# Altium footprint library TO.PcbLib: 38 footprints (part 2 of 3)
Each footprint in its own frame and in the unit in brackets; x right, y up, seen from the top. Pads: shape width x height; smd on the part's side, far side on the other; paste and mask are expansions set on the pad; w line width, h text height; cw(c..) or ccw(c..) is an arc to the next point about the centre after c.
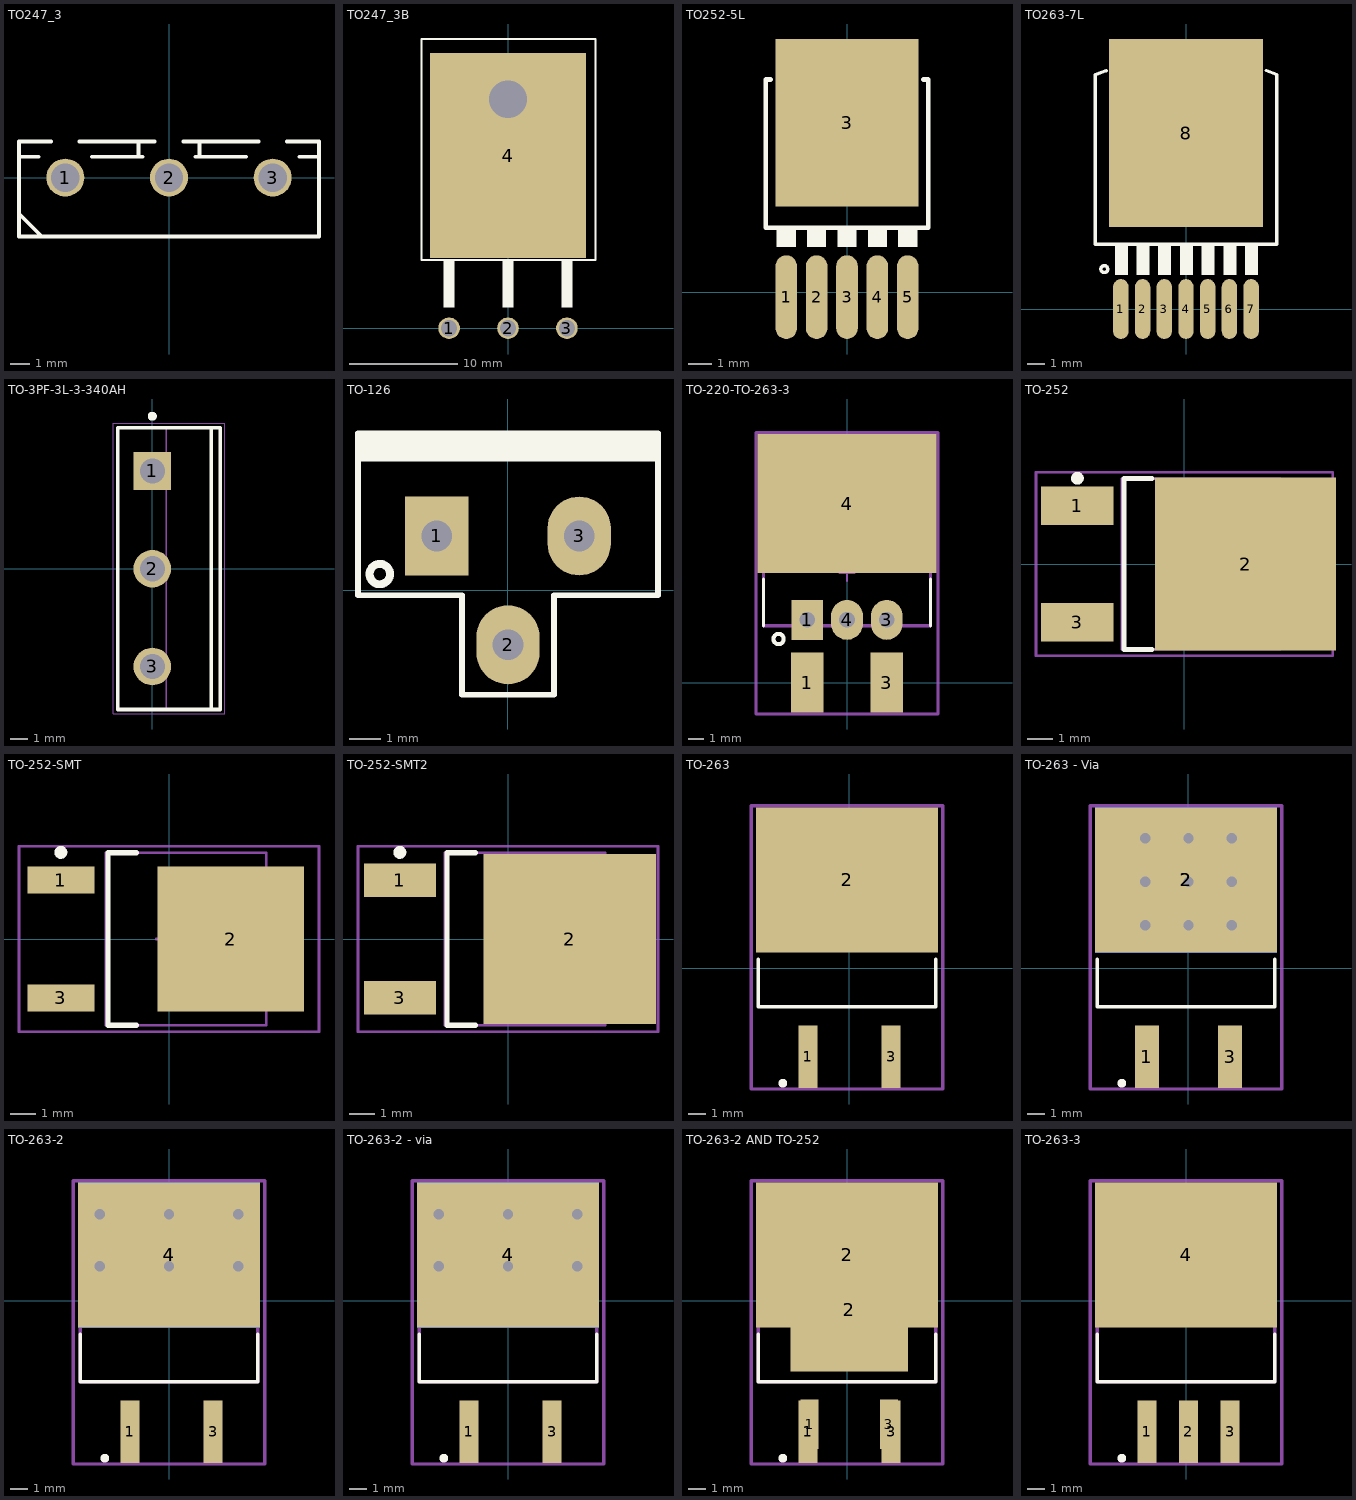
[diagram p1: the footprints below, top view; thin cyan lines are the x and y axes]

## TO247_3 [mm] "TO247, TO-247, TO-3P pitch: 5.5mm 16x5mm, TO-218"
pads (3):
  round 2 / inner round 2 / far side oval 2.4x3.6 hole 1.5: 1(-5.461,0) 2(0,0) 3(5.461,0)
Top Overlay:
  lines w0.2: -7.9,-1.9 -6.7,-3.1 ; -7.9,1.1 -6.861,1.1 ; -6.211,1.9 -7.9,1.9 -7.9,-3.1 7.9,-3.1 7.9,1.9 6.211,1.9 ; -4.711,1.9 -0.75,1.9 ; -4.061,1.1 -1.4,1.1 ; -1.6,1.1 -1.6,1.9 ; 0.75,1.9 4.711,1.9 ; 1.4,1.1 4.061,1.1 ; 1.6,1.1 1.6,1.9 ; 6.861,1.1 7.9,1.1
Top Assembly (Mech9):
  text ".Designator" at -3.65,-0.338 h1.5
3D body "TO-3P-3LD_new.step": height 23.92, standoff -3.48, extent -7.8,-3.003 7.8,1.807

## TO247_3B [mm] "TO247, TO-247, TO-3P BENDED, pitch: 5.5mm  TO-218"
pads (4):
  round 2 / inner round 2 / far side oval 2.4x3.6 hole 1.5: 1(-5.461,0) 2(0,0) 3(5.461,0)
  rect 14.5x19 smd: 4(0,16.001)
via 0,21.212 diameter 3.5 hole 3.5
Top Overlay:
  rectangle: -0.508,1.9 0.508,6.3
  rectangle: -5.988,1.9 -4.972,6.3
  region: 5.988,6.3 4.972,6.3 4.972,1.9 5.988,1.9
  lines w0.2: -8,6.318 8.1,6.318 8.1,26.8 -8,26.8 -8,6.318
  text "1" at -5.334,6.953 h1.02
  text "3" at 4.953,6.953 h1.02
Mechanical 1:
  circle w0.2: c0,21.2 r2
Top Assembly (Mech9):
  text ".Designator" at -3.65,-0.338 h1.5
3D body "User Library-TO-247_bent_leads.step": height 5.4, standoff -6.6, extent -7.95,-0.3 7.95,26.682

## TO252-5L [mm]
pads (6):
  oval 0.9x3.5 smd: 1(-2.54,-0.2) 2(-1.27,-0.2) 3(0,-0.2) 4(1.27,-0.2) 5(2.54,-0.2)
  rect 6x7 smd paste-5: 3(0,7.1)
Top Overlay:
  rectangle: 2.14,1.9 2.94,2.694
  rectangle: -0.4,1.9 0.4,2.694
  rectangle: -1.67,1.9 -0.87,2.694
  rectangle: -2.94,1.9 -2.14,2.694
  rectangle: 0.87,1.9 1.67,2.694
  lines w0.2: -3.2,8.9 -3.4,8.9 -3.4,2.7 3.4,2.7 3.4,8.9 3.2,8.9
Top Paste:
  rectangle: 0.2,5.2 1.2,6.2
  region: 1.2,6.6 1.2,7.6 0.2,7.6 0.2,6.6
  region: 2.6,6.2 1.6,6.2 1.6,5.2 2.6,5.2
  region: 1.2,4.8 0.2,4.8 0.2,3.8 1.2,3.8
  region: 2.6,3.8 2.6,4.8 1.6,4.8 1.6,3.8
  region: 1.6,7.6 1.6,6.6 2.6,6.6 2.6,7.6
  region: 2.6,8 2.6,9 1.6,9 1.6,8
  region: 1.2,9 0.2,9 0.2,8 1.2,8
  region: 2.6,10.4 1.6,10.4 1.6,9.4 2.6,9.4
  rectangle: 0.2,9.4 1.2,10.4
  region: -0.2,10.4 -1.2,10.4 -1.2,9.4 -0.2,9.4
  rectangle: -2.6,9.4 -1.6,10.4
  rectangle: -1.2,8 -0.2,9
  region: -1.6,8 -1.6,9 -2.6,9 -2.6,8
  region: -2.6,7.6 -2.6,6.6 -1.6,6.6 -1.6,7.6
  region: -1.6,3.8 -1.6,4.8 -2.6,4.8 -2.6,3.8
  rectangle: -1.2,3.8 -0.2,4.8
  rectangle: -2.6,5.2 -1.6,6.2
  region: -0.2,6.6 -0.2,7.6 -1.2,7.6 -1.2,6.6
  region: -0.2,6.2 -1.2,6.2 -1.2,5.2 -0.2,5.2
3D body "User Library-DPAK-5-1.step": height 2.4, standoff -0.01, extent -3.35,-0.866 3.35,10

## TO263-7L [mm]
pads (8):
  oval 0.9x3.5 smd: 1(-3.81,0) 2(-2.54,0) 3(-1.27,0) 4(0,0) 5(1.27,0) 6(2.54,0) 7(3.81,0)
  rect 9x11 smd paste-5: 8(0,10.3)
Top Overlay:
  circle w0.2: c-4.779,2.34 r0.2
  rectangle: 3.454,2 4.216,3.8
  rectangle: 2.184,2 2.946,3.8
  rectangle: 0.914,2 1.676,3.8
  rectangle: -0.356,2 0.406,3.8
  rectangle: -1.626,2 -0.864,3.8
  rectangle: -2.896,2 -2.134,3.8
  rectangle: -4.166,2 -3.404,3.8
  lines w0.2: -4.658,13.952 -5.3,13.709 -5.3,3.8 5.3,3.8 5.3,13.724 4.684,13.958
Top Paste:
  region: -0.2,7.7 -1.2,7.7 -1.2,6.7 -0.2,6.7
  rectangle: -4,6.7 -3,7.7
  region: -0.2,8.1 -0.2,9.1 -1.2,9.1 -1.2,8.1
  region: -3,5.3 -3,6.3 -4,6.3 -4,5.3
  rectangle: -4,8.1 -3,9.1
  rectangle: -2.6,6.7 -1.6,7.7
  rectangle: -1.2,5.3 -0.2,6.3
  region: -1.6,5.3 -1.6,6.3 -2.6,6.3 -2.6,5.3
  region: -2.6,9.1 -2.6,8.1 -1.6,8.1 -1.6,9.1
  region: -2.6,13.3 -2.6,12.3 -1.6,12.3 -1.6,13.3
  region: -1.6,9.5 -1.6,10.5 -2.6,10.5 -2.6,9.5
  rectangle: -1.2,9.5 -0.2,10.5
  rectangle: -2.6,10.9 -1.6,11.9
  rectangle: -4,12.3 -3,13.3
  region: -3,9.5 -3,10.5 -4,10.5 -4,9.5
  region: -0.2,12.3 -0.2,13.3 -1.2,13.3 -1.2,12.3
  rectangle: -4,10.9 -3,11.9
  region: -0.2,11.9 -1.2,11.9 -1.2,10.9 -0.2,10.9
  region: -0.2,14.7 -1.2,14.7 -1.2,13.7 -0.2,13.7
  rectangle: -4,13.7 -3,14.7
  rectangle: -2.6,13.7 -1.6,14.7
  region: 2.6,14.7 1.6,14.7 1.6,13.7 2.6,13.7
  region: 4,14.7 3,14.7 3,13.7 4,13.7
  rectangle: 0.2,13.7 1.2,14.7
  rectangle: 0.2,10.9 1.2,11.9
  region: 4,11.9 3,11.9 3,10.9 4,10.9
  region: 1.2,12.3 1.2,13.3 0.2,13.3 0.2,12.3
  region: 4,9.5 4,10.5 3,10.5 3,9.5
  region: 4,13.3 3,13.3 3,12.3 4,12.3
  region: 2.6,11.9 1.6,11.9 1.6,10.9 2.6,10.9
  region: 1.2,10.5 0.2,10.5 0.2,9.5 1.2,9.5
  region: 2.6,9.5 2.6,10.5 1.6,10.5 1.6,9.5
  region: 1.6,13.3 1.6,12.3 2.6,12.3 2.6,13.3
  region: 1.6,9.1 1.6,8.1 2.6,8.1 2.6,9.1
  region: 2.6,5.3 2.6,6.3 1.6,6.3 1.6,5.3
  region: 1.2,6.3 0.2,6.3 0.2,5.3 1.2,5.3
  region: 2.6,7.7 1.6,7.7 1.6,6.7 2.6,6.7
  region: 4,9.1 3,9.1 3,8.1 4,8.1
  region: 4,5.3 4,6.3 3,6.3 3,5.3
  region: 1.2,8.1 1.2,9.1 0.2,9.1 0.2,8.1
  region: 4,7.7 3,7.7 3,6.7 4,6.7
  rectangle: 0.2,6.7 1.2,7.7
3D body "User Library-D2PAK-7.step": height 4.5, standoff 0, extent -5.2,-1.6 5.2,14.074

## TO-3PF-3L-3-340AH [mm] "FM, 3-Leads, Body 15.7x5.7mm, Pitch 5.45mm"
height 29.9
pads (3):
  rect 2.1x2.1 hole 1.4: 1(0,5.45)
  round 2.1 hole 1.4: 2(0,0) 3(0,-5.45)
Top Overlay:
  circle w0.25: c0,8.5 r0.125
  lines w0.2: 3.28,-7.85 3.28,7.85 ; -1.92,-7.85 -1.92,7.85 3.78,7.85 3.78,-7.85 -1.92,-7.85
Mechanical 1:
  lines w0.1: 0.78,-7.85 0.78,7.85 ; -1.92,-7.85 -1.92,7.85 3.78,7.85 3.78,-7.85 -1.92,-7.85
Mechanical 15:
  lines w0.05: -2.17,-8.1 4.03,-8.1 4.03,8.1 -2.17,8.1 -2.17,-8.1
  lines w0.1: -0.5,0 0.5,0 ; 0,-0.5 0,0.5
3D body: height 23.64, standoff 23.6, extent 0.78,0.351 3.78,7.75
3D body: height 0, standoff -1.6, extent -0.475,5.05 0.475,5.85
3D body: height 25.76, standoff 25.4, extent 0.78,-7.75 3.78,-1.8
3D body: height 25.4, standoff 25.05, extent 0.78,-7.75 3.78,-1.8
3D body: height 26.09, standoff 25.75, extent 0.78,-7.75 3.78,-1.765
3D body: height 25.05, standoff 24.71, extent 0.78,-7.75 3.78,-1.765
3D body: height 26.41, standoff 26.09, extent 0.78,-7.75 3.78,-1.663
3D body: height 24.72, standoff 24.4, extent 0.78,-7.75 3.78,-1.663
3D body: height 26.68, standoff 26.4, extent 0.78,-7.75 3.78,-1.497
3D body: height 24.4, standoff 24.13, extent 0.78,-7.75 3.78,-1.497
3D body: height 26.9, standoff 26.67, extent 0.78,-7.75 3.78,-1.273
3D body: height 24.13, standoff 23.9, extent 0.78,-7.75 3.78,-1.273
3D body: height 0, standoff -1.6, extent -0.475,-0.4 0.475,0.4
3D body: height 4.8, standoff 0, extent -0.475,4.45 0.475,6.45
3D body: height 27.07, standoff 26.9, extent 0.78,-7.75 3.78,-1
3D body: height 23.91, standoff 23.74, extent 0.78,-7.75 3.78,-1
3D body: height 27.17, standoff 27.06, extent 0.78,-7.75 3.78,-0.689
3D body: height 23.74, standoff 23.63, extent 0.78,-7.75 3.78,-0.689
3D body: height 27.2, standoff 27.17, extent 0.78,-7.75 3.78,-0.351
3D body: height 25.76, standoff 25.4, extent 0.78,1.8 3.78,7.75
3D body: height 25.4, standoff 25.05, extent 0.78,1.8 3.78,7.75
3D body: height 26.09, standoff 25.75, extent 0.78,1.765 3.78,7.75
3D body: height 25.05, standoff 24.71, extent 0.78,1.765 3.78,7.75
3D body: height 26.41, standoff 26.09, extent 0.78,1.663 3.78,7.75
3D body: height 24.72, standoff 24.4, extent 0.78,1.663 3.78,7.75
3D body: height 26.68, standoff 26.4, extent 0.78,1.497 3.78,7.75
3D body: height 24.4, standoff 24.13, extent 0.78,1.497 3.78,7.75
3D body: height 26.9, standoff 26.67, extent 0.78,1.273 3.78,7.75
3D body: height 24.13, standoff 23.9, extent 0.78,1.273 3.78,7.75
3D body: height 27.07, standoff 26.9, extent 0.78,1 3.78,7.75
3D body: height 0, standoff -1.6, extent -0.475,-5.85 0.475,-5.05
3D body: height 4.8, standoff 0, extent -0.475,-6.45 0.475,-4.45
3D body: height 23.64, standoff 23.6, extent 0.78,-7.75 3.78,-0.351
3D body: height 23.91, standoff 23.74, extent 0.78,1 3.78,7.75
3D body: height 27.17, standoff 27.06, extent 0.78,0.689 3.78,7.75
3D body: height 23.74, standoff 23.63, extent 0.78,0.689 3.78,7.75
3D body: height 27.2, standoff 27.17, extent 0.78,0.351 3.78,7.75
3D body: height 23.6, standoff 19.9, extent 0.78,-7.75 3.78,7.75
3D body: height 4.8, standoff 0, extent -0.475,-1 0.475,1
3D body: height 29.9, standoff 27.2, extent 0.78,-7.75 3.78,7.75
3D body: height 19.9, standoff 4.8, extent -1.92,-7.85 3.78,7.85

## TO-126 [mil] "TO-126 - 1-2-3"
height 200
pads (3):
  rect 80x100 hole 39: 1(-90.16,68.9)
  oval 80x100 hole 39: 2(0,-68.9) 3(90.16,68.9)
Top Overlay:
  circle w10: c-162.4,20.67 r12.97
  rectangle: -189.96,162.9 189.96,198.9
  lines w7: -189.96,-6.1 -189.96,198.9 189.96,198.9 189.96,-6.1 58.27,-6.1 58.27,-132.09 -58.27,-132.09 -58.27,-6.1 -189.96,-6.1
3D body "TO-126_factory.stp": height 622.05, standoff -354.33, extent -169.29,20.9 169.29,129.17

## TO-220-TO-263-3 [mil]
pads (6):
  rect 81.89x150 smd paste+0 mask+0: 1(-100,0) 3(100,0)
  rect 80x100 hole 39: 1(-100,157.48)
  oval 80x100 hole 39: 3(100,157.48) 4(0,157.48)
  rect 450x350 smd paste+0 mask+0: 4(0,450)
Top Overlay:
  circle w10: c-172.03,109.48 r12.97
  lines w7.87: -210.04,142.72 -210.04,260.24 ; 210.04,142.72 210.04,260.24
Top Courtyard:
  lines w7.87: -228.94,-78.94 228.94,-78.94 228.94,628.94 -228.94,628.94 -228.94,-78.94
  text ".Designator" at 0,274.98 h39.37
Mechanical 12:
  lines w7.87: -210.04,142.72 210.04,142.72 210.04,522.64 -210.04,522.64 -210.04,142.72
Mechanical 15:
  lines w3.94: -19.68,275 19.68,275 ; 0,255.31 0,294.69
  lines w7.87: -228.94,-78.94 228.94,-78.94 228.94,628.94 -228.94,628.94 -228.94,-78.94
3D body "IC_ON_Semiconductor_LM7812CT_eec.STEP": height 803.15, standoff -157.48, extent -200,71.73 200,243.11
3D body "Trans_Infineon_IRF3205SPBF_eec.STEP": height 200.2, standoff 0, extent -200,-37.73 200,562.5

## TO-252 [mm] "KVU D-PAK, 3-Pads, Body 6,2x6,7mm (max), IPC Medium Density"
height 2.4
pads (3):
  rect 2.85x1.5 smd: 1(-4.2,2.29) 3(-4.2,-2.29)
  rect 7.1x6.8 smd: 2(2.4,0)
Top Overlay:
  circle w0.25: c-4.2,3.365 r0.125
  lines w0.2: -1.27,-3.35 -2.375,-3.35 -2.375,3.35 -1.27,3.35
Mechanical 13:
  lines w0.1: -2.45,-3.35 3.77,-3.35 3.77,3.35 -2.45,3.35 -2.45,-3.35
Mechanical 15:
  lines w0.1: -0.5,0 0.5,0 ; 0,-0.5 0,0.5 ; -5.825,-3.6 5.825,-3.6 5.825,3.6 -5.825,3.6 -5.825,-3.6
3D body "User Library-DPAK_TO-252AA.step": height 2.37, standoff -0.03, extent -5.05,-3.367 5.05,3.367

## TO-252-SMT [mm] "KVU D-PAK, 3-Pads, Body 6,2x6,7mm (max), IPC Medium Density"
height 2.4
pads (3):
  rect 2.6x1.06 smd: 1(-4.2,2.29) 3(-4.2,-2.29)
  rect 5.7x5.632 smd: 2(2.4,0)
Top Overlay:
  circle w0.25: c-4.2,3.365 r0.125
  lines w0.2: -1.27,-3.35 -2.375,-3.35 -2.375,3.35 -1.27,3.35
Mechanical 13:
  lines w0.1: -2.45,-3.35 3.77,-3.35 3.77,3.35 -2.45,3.35 -2.45,-3.35
Mechanical 15:
  lines w0.1: -0.5,0 0.5,0 ; 0,-0.5 0,0.5 ; -5.825,-3.6 5.825,-3.6 5.825,3.6 -5.825,3.6 -5.825,-3.6
3D body "User Library-DPAK_TO-252AA.step": height 2.37, standoff -0.03, extent -5.05,-3.367 5.05,3.367

## TO-252-SMT2 [mm] "KVU D-PAK, 3-Pads, Body 6,2x6,7mm (max), IPC Medium Density"
height 2.4
pads (3):
  rect 2.8x1.3 smd: 1(-4.2,2.29) 3(-4.2,-2.29)
  rect 6.7x6.6 smd: 2(2.4,0)
Top Overlay:
  circle w0.25: c-4.2,3.365 r0.125
  lines w0.2: -1.27,-3.35 -2.375,-3.35 -2.375,3.35 -1.27,3.35
Mechanical 13:
  lines w0.1: -2.45,-3.35 -2.45,3.35 3.77,3.35 3.77,-3.35 -2.45,-3.35
Mechanical 15:
  lines w0.1: -0.5,0 0.5,0 ; 0,-0.5 0,0.5 ; -5.825,-3.6 -5.825,3.6 5.825,3.6 5.825,-3.6 -5.825,-3.6
3D body "User Library-DPAK_TO-252AA.step": height 2.37, standoff -0.03, extent -5.05,-3.367 5.05,3.367

## TO-263 [mm]
pads (3):
  rect 1.1x3.6 smd: 1(-2.396,-5.106) 3(2.396,-5.106)
  rect 10.49x8.38 smd paste+0 mask+0: 2(-0.144,5.106)
Top Overlay:
  circle w0.25: c-3.844,-6.624 r0.125
  lines w0.2: -5.262,0.542 -5.262,-2.222 4.974,-2.222 4.974,0.542
Mechanical 15:
  lines w0.1: -0.644,2.451 0.356,2.451 ; -0.144,1.951 -0.144,2.951
  lines w0.2: -5.679,-6.958 5.392,-6.958 5.392,9.397 -5.679,9.397 -5.679,-6.958
  text ".Designator" at -3.65,-0.338 h1.5
3D body "to263-3_p5-08_l10-414_w4-826.stp": height 4.83, standoff -0.01, extent -5.207,-6.68 5.207,9.119

## TO-263 - Via [mm]
pads (4):
  rect 1.4x3.6 smd: 1(-2.396,-5.106) 3(2.396,-5.106)
  rect 10.49x8.38 smd paste+0 mask+0: 2(-0.144,5.106)
  rect 10.49x8.38 smd far side paste+0 mask+0: 2(-0.144,5.106)
via 2.5,2.5 diameter 1.2 hole 0.6
via 0,2.5 diameter 1.2 hole 0.6
via -2.5,2.5 diameter 1.2 hole 0.6
via -2.5,7.5 diameter 1.2 hole 0.6
via 0,7.5 diameter 1.2 hole 0.6
via 2.5,7.5 diameter 1.2 hole 0.6
via 2.5,5 diameter 1.2 hole 0.6
via -2.5,5 diameter 1.2 hole 0.6
via 0,5 diameter 1.2 hole 0.6
Top Overlay:
  circle w0.25: c-3.844,-6.624 r0.125
  lines w0.2: -5.262,0.542 -5.262,-2.222 4.974,-2.222 4.974,0.542
Mechanical 15:
  lines w0.1: -0.644,2.451 0.356,2.451 ; -0.144,1.951 -0.144,2.951
  lines w0.2: -5.679,-6.958 5.392,-6.958 5.392,9.397 -5.679,9.397 -5.679,-6.958
  text ".Designator" at -3.65,-0.338 h1.5
3D body "to263-3_p5-08_l10-414_w4-826.stp": height 4.83, standoff -0.01, extent -5.207,-6.68 5.207,9.119

## TO-263-2 [mm]
pads (4):
  rect 1.1x3.6 smd: 1(-2.253,-7.558) 3(2.54,-7.558)
  rect 10.49x8.38 smd paste+0 mask+0: 4(0,2.655)
  rect 10.49x8.38 smd far side paste+0 mask+0: 4(0,2.655)
via 4,2 diameter 1.2 hole 0.6
via 0,2 diameter 1.2 hole 0.6
via -4,2 diameter 1.2 hole 0.6
via 4,5 diameter 1.2 hole 0.6
via 0,5 diameter 1.2 hole 0.6
via -4,5 diameter 1.2 hole 0.6
Top Overlay:
  circle w0.25: c-3.7,-9.075 r0.125
  lines w0.2: -5.118,-1.91 -5.118,-4.674 5.118,-4.674 5.118,-1.91
Top Courtyard:
  lines w0.2: -5.536,-9.41 -5.536,6.945 5.536,6.945 5.536,-9.41 -5.536,-9.41
  text ".Designator" at 0,-1.233 h1
Mechanical 12:
  lines w0.2: -5.118,-4.674 -5.118,4.674 5.118,4.674 5.118,-4.674 -5.118,-4.674
Mechanical 15:
  lines w0.1: -0.5,0 0.5,0 ; 0,-0.5 0,0.5
  lines w0.2: -5.536,-9.41 -5.536,6.945 5.536,6.945 5.536,-9.41 -5.536,-9.41
3D body "to263-3_p5-08_l10-414_w4-826.stp": height 4.83, standoff -0.01, extent -5.063,-9.132 5.351,6.667

## TO-263-2 - via [mm]
pads (4):
  rect 1.1x3.6 smd: 1(-2.253,-7.558) 3(2.54,-7.558)
  rect 10.49x8.38 smd paste+0 mask+0: 4(0,2.655)
  rect 10.49x8.38 smd far side paste+0 mask+0: 4(0,2.655)
via 4,2 diameter 1.2 hole 0.6
via 0,2 diameter 1.2 hole 0.6
via -4,2 diameter 1.2 hole 0.6
via 4,5 diameter 1.2 hole 0.6
via 0,5 diameter 1.2 hole 0.6
via -4,5 diameter 1.2 hole 0.6
Top Overlay:
  circle w0.25: c-3.7,-9.075 r0.125
  lines w0.2: -5.118,-1.91 -5.118,-4.674 5.118,-4.674 5.118,-1.91
Top Courtyard:
  lines w0.2: -5.536,-9.41 -5.536,6.945 5.536,6.945 5.536,-9.41 -5.536,-9.41
  text ".Designator" at 0,-1.233 h1
Mechanical 12:
  lines w0.2: -5.118,-4.674 -5.118,4.674 5.118,4.674 5.118,-4.674 -5.118,-4.674
Mechanical 15:
  lines w0.1: -0.5,0 0.5,0 ; 0,-0.5 0,0.5
  lines w0.2: -5.536,-9.41 -5.536,6.945 5.536,6.945 5.536,-9.41 -5.536,-9.41
3D body "to263-3_p5-08_l10-414_w4-826.stp": height 4.83, standoff -0.01, extent -5.063,-9.132 5.351,6.667

## TO-263-2 AND TO-252 [mm]
pads (6):
  rect 1.1x3.6 smd: 1(-2.253,-7.558) 3(2.54,-7.558)
  rect 1.05x2.85 smd: 1(-2.163,-7.121) 3(2.417,-7.121)
  rect 10.49x8.38 smd paste+0 mask+0: 2(0,2.655)
  rect 6.8x7.1 smd: 2(0.127,-0.521)
Top Overlay:
  circle w0.25: c-3.7,-9.075 r0.125
  lines w0.2: -5.118,-1.91 -5.118,-4.674 5.118,-4.674 5.118,-1.91
Top Courtyard:
  lines w0.2: -5.536,-9.41 -5.536,6.945 5.536,6.945 5.536,-9.41 -5.536,-9.41
  text ".Designator" at 0,-1.233 h1
Mechanical 12:
  lines w0.2: -5.118,-4.674 -5.118,4.674 5.118,4.674 5.118,-4.674 -5.118,-4.674
Mechanical 15:
  lines w0.1: -0.5,0 0.5,0 ; 0,-0.5 0,0.5
  lines w0.2: -5.536,-9.41 -5.536,6.945 5.536,6.945 5.536,-9.41 -5.536,-9.41
3D body "to263-3_p5-08_l10-414_w4-826.stp": height 4.83, standoff -0.01, extent -5.063,-9.132 5.351,6.667

## TO-263-3 [mm]
pads (4):
  rect 1.1x3.6 smd: 1(-2.253,-7.558) 2(0.144,-7.558) 3(2.54,-7.558)
  rect 10.49x8.38 smd paste+0 mask+0: 4(0,2.655)
Top Overlay:
  circle w0.25: c-3.7,-9.075 r0.125
  lines w0.2: -5.118,-1.91 -5.118,-4.674 5.118,-4.674 5.118,-1.91
Top Courtyard:
  lines w0.2: -5.536,-9.41 5.536,-9.41 5.536,6.945 -5.536,6.945 -5.536,-9.41
  text ".Designator" at 0,-1.233 h1
Mechanical 12:
  lines w0.2: -5.118,-4.674 5.118,-4.674 5.118,4.674 -5.118,4.674 -5.118,-4.674
Mechanical 15:
  lines w0.1: -0.5,0 0.5,0 ; 0,-0.5 0,0.5
  lines w0.2: -5.536,-9.41 5.536,-9.41 5.536,6.945 -5.536,6.945 -5.536,-9.41
3D body "to263-3_p5-08_l10-414_w4-826.stp": height 4.83, standoff -0.01, extent -5.063,-9.132 5.351,6.667